# Altium footprint library boost_converter_Pcblib.PcbLib: 21 footprints (part 1 of 2)
Each footprint in its own frame and in the unit in brackets; x right, y up, seen from the top. Pads: shape width x height; smd on the part's side, far side on the other; paste and mask are expansions set on the pad; w line width, h text height; cw(c..) or ccw(c..) is an arc to the next point about the centre after c.
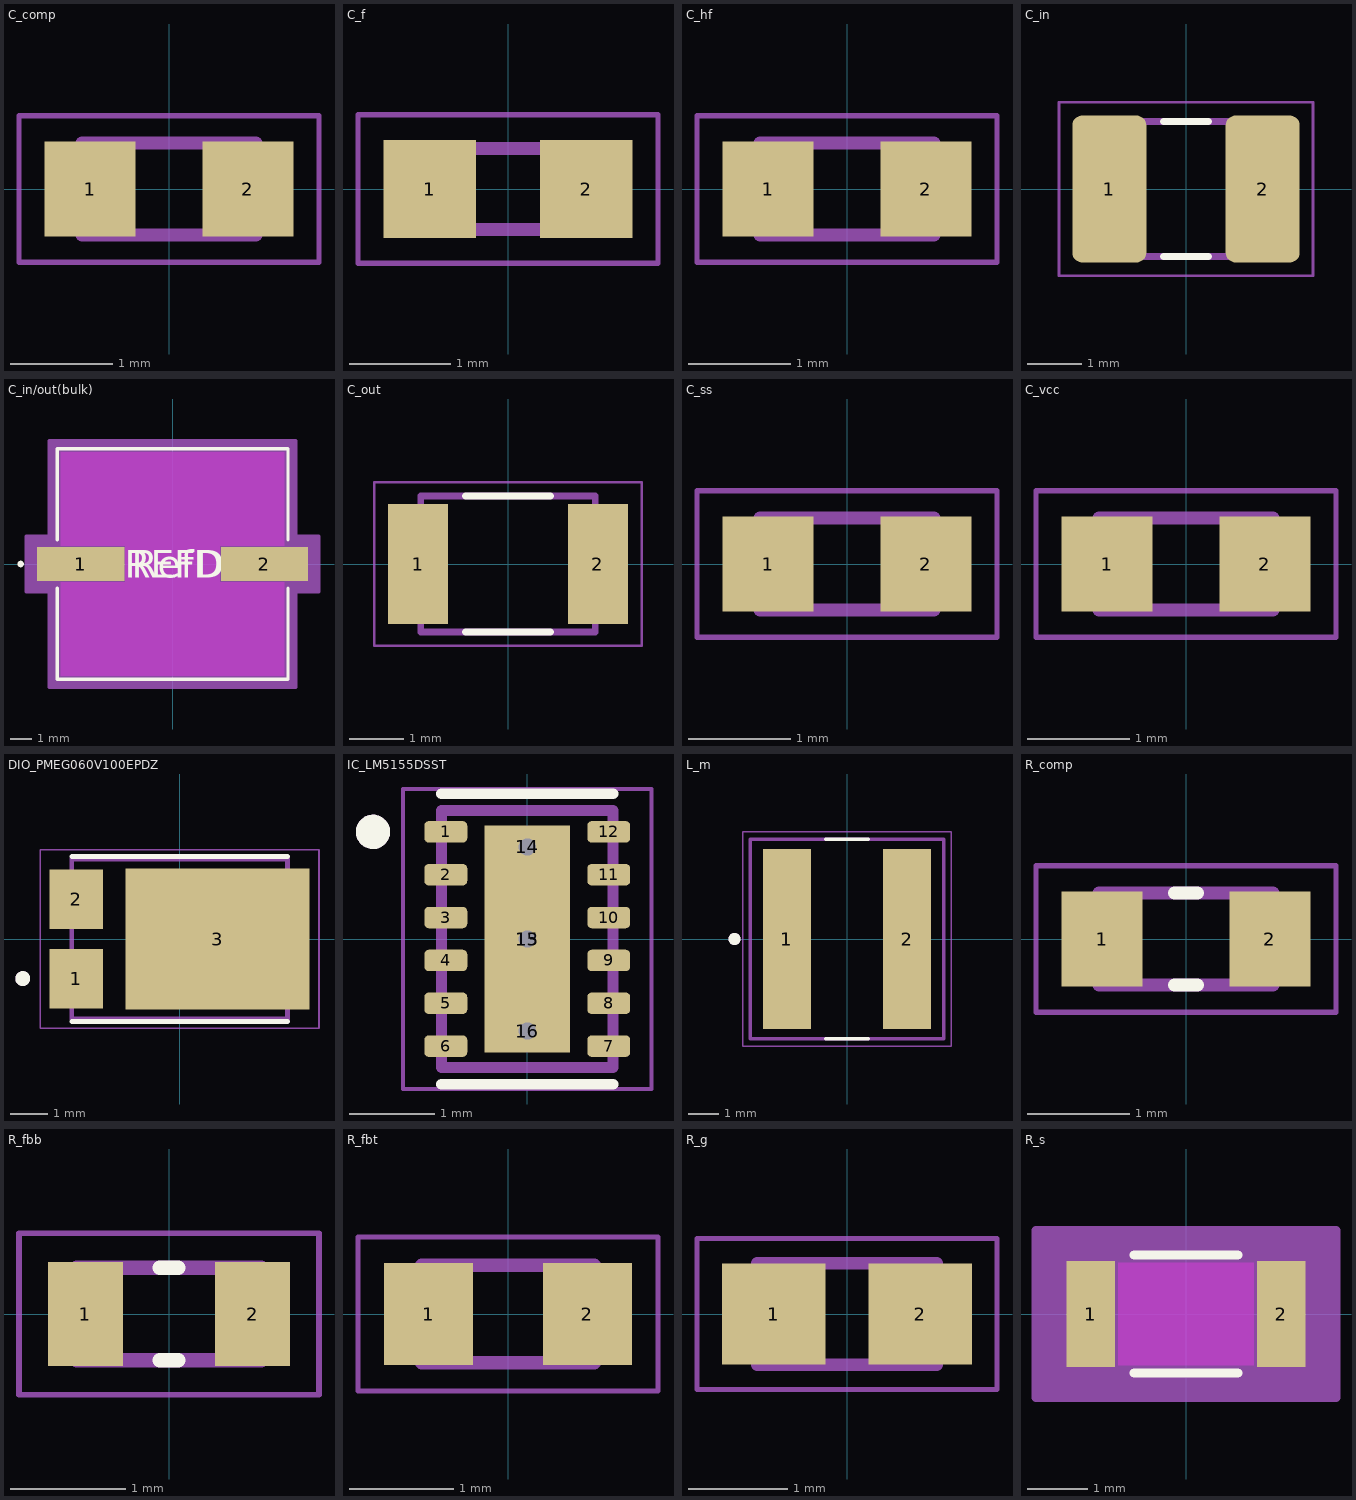
[diagram p0: the footprints below, top view; thin cyan lines are the x and y axes]

## C_comp [mm]
pads (2):
  rect 0.89x0.93 smd: 1(-0.77,0) 2(0.77,0)
Mechanical 4:
  lines w0.127: -0.85,-0.45 0.85,-0.45 ; -0.85,-0.45 -0.85,0.45 ; -0.85,-0.45 0.85,-0.45 ; -0.85,-0.45 -0.85,0.45 ; -0.85,0.45 0.85,0.45 ; -0.85,0.45 0.85,0.45 ; 0.85,-0.45 0.85,0.45 ; 0.85,-0.45 0.85,0.45
Mechanical 16:
  lines w0.05: -1.465,-0.715 1.465,-0.715 1.465,0.715 -1.465,0.715 -1.465,-0.715

## C_f [mm]
pads (2):
  rect 0.92x0.97 smd paste+0 mask+0.102: 1(-0.775,0) 2(0.775,0)
Mechanical 13:
  lines w0.127: -0.8,-0.4 0.8,-0.4 0.8,0.4 -0.8,0.4 -0.8,-0.4
Mechanical 15:
  lines w0.05: -1.485,-0.735 -1.485,0.735 1.485,0.735 1.485,-0.735 -1.485,-0.735

## C_hf [mm]
pads (2):
  rect 0.89x0.93 smd: 1(-0.77,0) 2(0.77,0)
Mechanical 13:
  lines w0.127: -0.85,-0.45 0.85,-0.45 0.85,0.45 -0.85,0.45 -0.85,-0.45
Mechanical 15:
  lines w0.05: -1.465,-0.715 1.465,-0.715 1.465,0.715 -1.465,0.715 -1.465,-0.715
3D body "step_temp.STEP": height 0.9, standoff 0, extent -0.8,-0.4 0.8,0.4

## C_in [mm]
pads (2):
  rrect25% 1.37x2.72 smd: 1(-1.421,0) 2(1.421,0)
Top Overlay:
  lines w0.127: -0.42,-1.25 0.42,-1.25 ; -0.42,1.25 0.42,1.25
Mechanical 13:
  lines w0.127: -1.6,-1.25 -1.6,1.25 1.6,1.25 1.6,-1.25 -1.6,-1.25
Mechanical 15:
  lines w0.05: -2.356,-1.61 -2.356,1.61 2.356,1.61 2.356,-1.61 -2.356,-1.61
3D body "step_temp.STEP": height 2.7, standoff 0, extent -1.6,-1.25 1.6,1.25

## C_in/out(bulk) [mil]
pads (2):
  rect 160x63 smd paste+0 mask+0: 1(-168.5,0) 2(168.5,0)
Top Layer keep-out:
  region: -204.5,-204.5 -204.5,-33.5 204.5,-33.5 204.5,-204.5
  region: -204.5,33.5 -204.5,204.5 204.5,204.5 204.5,33.5
  region: -86.5,-33.5 -86.5,33.5 86.5,33.5 86.5,-33.5
Top Overlay:
  circle w6: c-278.5,0 r3
  lines w6: -211.5,-44.6 -211.5,-211.5 211.5,-211.5 211.5,-44.6 ; -211.5,44.6 -211.5,211.5 211.5,211.5 211.5,44.6
  text "REFDES" at -87.5,-25 h50
  text "RefDes" at -75,-25 h50
Keep-Out Layer:
  region: -86.5,-33.5 -86.5,33.5 86.5,33.5 86.5,-33.5
Mechanical 13:
  circle w0: c-186.5,0 r3
  lines w1: -206.5,-103.25 -103.25,-206.5 ; -206.5,103.25 -103.25,206.5 ; -206.5,-206.5 -206.5,206.5 206.5,206.5 206.5,-206.5 -206.5,-206.5
  text "RefDes2" at -87.5,-25 h50
Mechanical 15:
  region: -226.5,-51.5 -268.5,-51.5 -268.5,51.5 -226.5,51.5 -226.5,226.5 226.5,226.5 226.5,51.5 268.5,51.5 268.5,-51.5 226.5,-51.5 226.5,-226.5 -226.5,-226.5
  lines w6: -268.5,-51.5 -226.5,-51.5 -226.5,-226.5 226.5,-226.5 226.5,-51.5 268.5,-51.5 268.5,51.5 226.5,51.5 226.5,226.5 -226.5,226.5 -226.5,51.5 -268.5,51.5 -268.5,-51.5
3D body "CAP_HHXC500ARA101MJA0G_NIP.step": height 415.12, standoff 0, extent -220.51,-206.5 220.51,206.5

## C_out [mm]
height 2.8
pads (2):
  rect 1.1x2.2 smd: 1(-1.65,0) 2(1.65,0)
Top Overlay:
  lines w0.127: -0.78,-1.25 0.78,-1.25 ; -0.78,1.25 0.78,1.25
Mechanical 13:
  lines w0.127: -1.6,-1.25 -1.6,1.25 1.6,1.25 1.6,-1.25 -1.6,-1.25
Mechanical 15:
  lines w0.05: -2.45,-1.5 -2.45,1.5 2.45,1.5 2.45,-1.5 -2.45,-1.5
3D body "step_temp.STEP": height 2.8, standoff 0, extent -1.6,-1.25 1.6,1.25

## C_ss [mm]
pads (2):
  rect 0.89x0.93 smd: 1(-0.77,0) 2(0.77,0)
Mechanical 13:
  lines w0.127: -0.85,-0.45 0.85,-0.45 0.85,0.45 -0.85,0.45 -0.85,-0.45
Mechanical 15:
  lines w0.05: -1.465,-0.715 1.465,-0.715 1.465,0.715 -1.465,0.715 -1.465,-0.715

## C_vcc [mm]
pads (2):
  rect 0.89x0.93 smd: 1(-0.77,0) 2(0.77,0)
Mechanical 13:
  lines w0.127: -0.85,-0.45 0.85,-0.45 0.85,0.45 -0.85,0.45 -0.85,-0.45
Mechanical 15:
  lines w0.05: -1.465,-0.715 1.465,-0.715 1.465,0.715 -1.465,0.715 -1.465,-0.715
3D body "step_temp.STEP": height 0.9, standoff 0, extent -0.8,-0.4 0.8,0.4

## DIO_PMEG060V100EPDZ [mm]
height 0.82
pads (3):
  rect 1.44x1.6 smd paste-2 mask+0.1: 1(-2.78,-1.065) 2(-2.78,1.065)
  rect 4.96x3.8 smd paste-3 mask+0.1: 3(1.02,0)
Top Overlay:
  circle w0.2: c-4.223,-1.065 r0.1
  lines w0.127: -2.9,-2.22 2.9,-2.22 ; -2.9,2.22 2.9,2.22
Top Paste:
  region: 3.45,-1.2 2.85,-1.2 2.85,1.2 3.45,1.2
  region: 2.65,-1.8 0.75,-1.8 0.75,-0.1 2.65,-0.1
  region: 2.65,0.1 0.75,0.1 0.75,1.8 2.65,1.8
  region: 0.55,-1.8 -1.35,-1.8 -1.35,-0.1 0.55,-0.1
  region: 0.55,0.1 -1.35,0.1 -1.35,1.8 0.55,1.8
  region: -2.11,-1.765 -3.45,-1.765 -3.45,-0.365 -2.11,-0.365
  region: -2.11,0.365 -3.45,0.365 -3.45,1.765 -2.11,1.765
Mechanical 13:
  circle w0.2: c-4.223,-1.065 r0.1
  lines w0.127: -2.9,-2.15 -2.9,2.15 2.9,2.15 2.9,-2.15 -2.9,-2.15
Mechanical 15:
  lines w0.05: -3.75,-2.4 -3.75,2.4 3.75,2.4 3.75,-2.4 -3.75,-2.4
3D body "step_temp.STEP": height 0.82, standoff 0, extent -2.15,-3.25 2.15,3.25

## IC_LM5155DSST [mm]
height 0.8
pads (16):
  rrect40% 0.5x0.25 smd: 1(-0.95,1.25) 2(-0.95,0.75) 3(-0.95,0.25) 4(-0.95,-0.25) 5(-0.95,-0.75) 6(-0.95,-1.25) 7(0.95,-1.25) 8(0.95,-0.75) 9(0.95,-0.25) 10(0.95,0.25) 11(0.95,0.75) 12(0.95,1.25)
  rect 1x2.65 smd paste-2: 13(0,0)
  round 0.4 hole 0.2 mask+0: 14(0,1.075) 15(0,0) 16(0,-1.075)
Top Overlay:
  circle w0.2: c-1.8,1.25 r0.1
  lines w0.127: -1,-1.695 1,-1.695 ; -1,1.695 1,1.695
Top Paste:
  region: 0.475,-1.27 -0.475,-1.27 -0.475,-0.1 0.475,-0.1
  region: 0.475,0.1 -0.475,0.1 -0.475,1.27 0.475,1.27
Mechanical 13:
  circle w0.2: c-1.8,1.25 r0.1
  lines w0.127: -1,-1.5 1,-1.5 1,1.5 -1,1.5 -1,-1.5
Mechanical 15:
  lines w0.05: -1.45,-1.75 1.45,-1.75 1.45,1.75 -1.45,1.75 -1.45,-1.75

## L_m [mm]
pads (2):
  rect 1.6x6 smd: 1(-2,0) 2(2,0)
Top Overlay:
  circle w0.2: c-3.75,0 r0.1
  lines w0.127: -0.7,-3.325 0.7,-3.325 ; -0.7,3.325 0.7,3.325
Mechanical 4:
  circle w0.2: c-3.75,0 r0.1
  circle w0.2: c-3.75,0 r0.1
  lines w0.127: -3.225,-3.325 -3.225,3.325 ; -3.225,-3.325 3.225,-3.325 ; -3.225,-3.325 -3.225,3.325 ; -3.225,-3.325 3.225,-3.325 ; -3.225,3.325 3.225,3.325 ; -3.225,3.325 3.225,3.325 ; 3.225,-3.325 3.225,3.325 ; 3.225,-3.325 3.225,3.325
Mechanical 16:
  lines w0.05: -3.475,-3.575 -3.475,3.575 3.475,3.575 3.475,-3.575 -3.475,-3.575

## R_comp [mm]
pads (2):
  rect 0.79x0.93 smd: 1(-0.82,0) 2(0.82,0)
Top Overlay:
  lines w0.127: -0.11,-0.45 0.11,-0.45 ; -0.11,0.45 0.11,0.45
Mechanical 13:
  lines w0.127: -0.85,-0.45 0.85,-0.45 0.85,0.45 -0.85,0.45 -0.85,-0.45
Mechanical 15:
  lines w0.05: -1.465,-0.715 1.465,-0.715 1.465,0.715 -1.465,0.715 -1.465,-0.715
3D body "step_temp.STEP": height 0.55, standoff 0, extent -0.8,-0.4 0.8,0.4

## R_fbb [mm]
height 0.45
pads (2):
  rect 0.65x0.9 smd paste+0 mask+0.102: 1(-0.725,0) 2(0.725,0)
Top Overlay:
  lines w0.127: -0.08,-0.4 0.08,-0.4 ; -0.08,0.4 0.08,0.4
Mechanical 13:
  lines w0.127: -0.8,-0.4 0.8,-0.4 0.8,0.4 -0.8,0.4 -0.8,-0.4
Mechanical 15:
  lines w0.05: -1.3,-0.7 1.3,-0.7 1.3,0.7 -1.3,0.7 -1.3,-0.7
3D body "step_temp.STEP": height 0.45, standoff 0, extent -0.8,-0.4 0.8,0.4

## R_fbt [mm]
pads (2):
  rect 0.86x0.98 smd: 1(-0.765,0) 2(0.765,0)
Mechanical 13:
  lines w0.127: -0.83,-0.47 -0.83,0.47 0.83,0.47 0.83,-0.47 -0.83,-0.47
Mechanical 15:
  lines w0.05: -1.444,-0.74 -1.444,0.74 1.444,0.74 1.444,-0.74 -1.444,-0.74
3D body "step_temp.STEP": height 0.55, standoff 0, extent -0.775,-0.425 0.775,0.425

## R_g [mm]
pads (2):
  rect 1.04x1.02 smd: 1(-0.735,0) 2(0.735,0)
Mechanical 13:
  lines w0.127: -0.9,-0.51 0.9,-0.51 0.9,0.51 -0.9,0.51 -0.9,-0.51
Mechanical 15:
  lines w0.05: -1.508,-0.761 1.508,-0.761 1.508,0.761 -1.508,0.761 -1.508,-0.761
3D body "step_temp.STEP": height 0.55, standoff 0, extent -0.8,-0.4 0.8,0.4

## R_s [mm]
pads (2):
  rect 0.805x1.751 smd paste+0 mask+0: 1(-1.577,0) 2(1.577,0)
Top Layer keep-out:
  region: -1.124,-0.799 -1.124,0.799 1.124,0.799 1.124,-0.799
Top Overlay:
  lines w0.152: -0.858,-0.977 0.858,-0.977 ; -0.858,0.977 0.858,0.977
  text ".Designator" at -3.492,-0.635 h1.27
Keep-Out Layer:
  region: -1.124,-0.85 -1.124,0.85 1.124,0.85 1.124,-0.85
Mechanical 13:
  lines w0.025: -1.675,-0.85 -1.675,0.85 ; -1.675,-0.85 1.675,-0.85 ; -1.675,-0.85 -1.175,-0.85 -1.175,0.85 -1.675,0.85 ; -1.675,-0.85 -1.675,0.85 ; -1.675,0.85 1.675,0.85 ; 1.675,-0.85 1.675,0.85 ; 1.675,-0.85 1.675,0.85 ; 1.675,-0.85 1.175,-0.85 1.175,0.85 1.675,0.85
  text ".Designator" at -3.492,-0.635 h1.27
Mechanical 15:
  region: 2.488,-1.383 -2.488,-1.383 -2.488,1.383 2.488,1.383
  lines w0.152: -2.488,-1.383 2.488,-1.383 2.488,1.383 -2.488,1.383 -2.488,-1.383
3D body "RES_1206_OHM.step": height 0.55, standoff 0, extent -1.675,-0.85 1.675,0.85